# Altium footprint library Altium_Box_Header_MPC3.PcbLib: 235 footprints (part 3 of 15)
Each footprint in its own frame and in the unit in brackets; x right, y up, seen from the top. Pads: shape width x height; smd on the part's side, far side on the other; paste and mask are expansions set on the pad; w line width, h text height; cw(c..) or ccw(c..) is an arc to the next point about the centre after c.
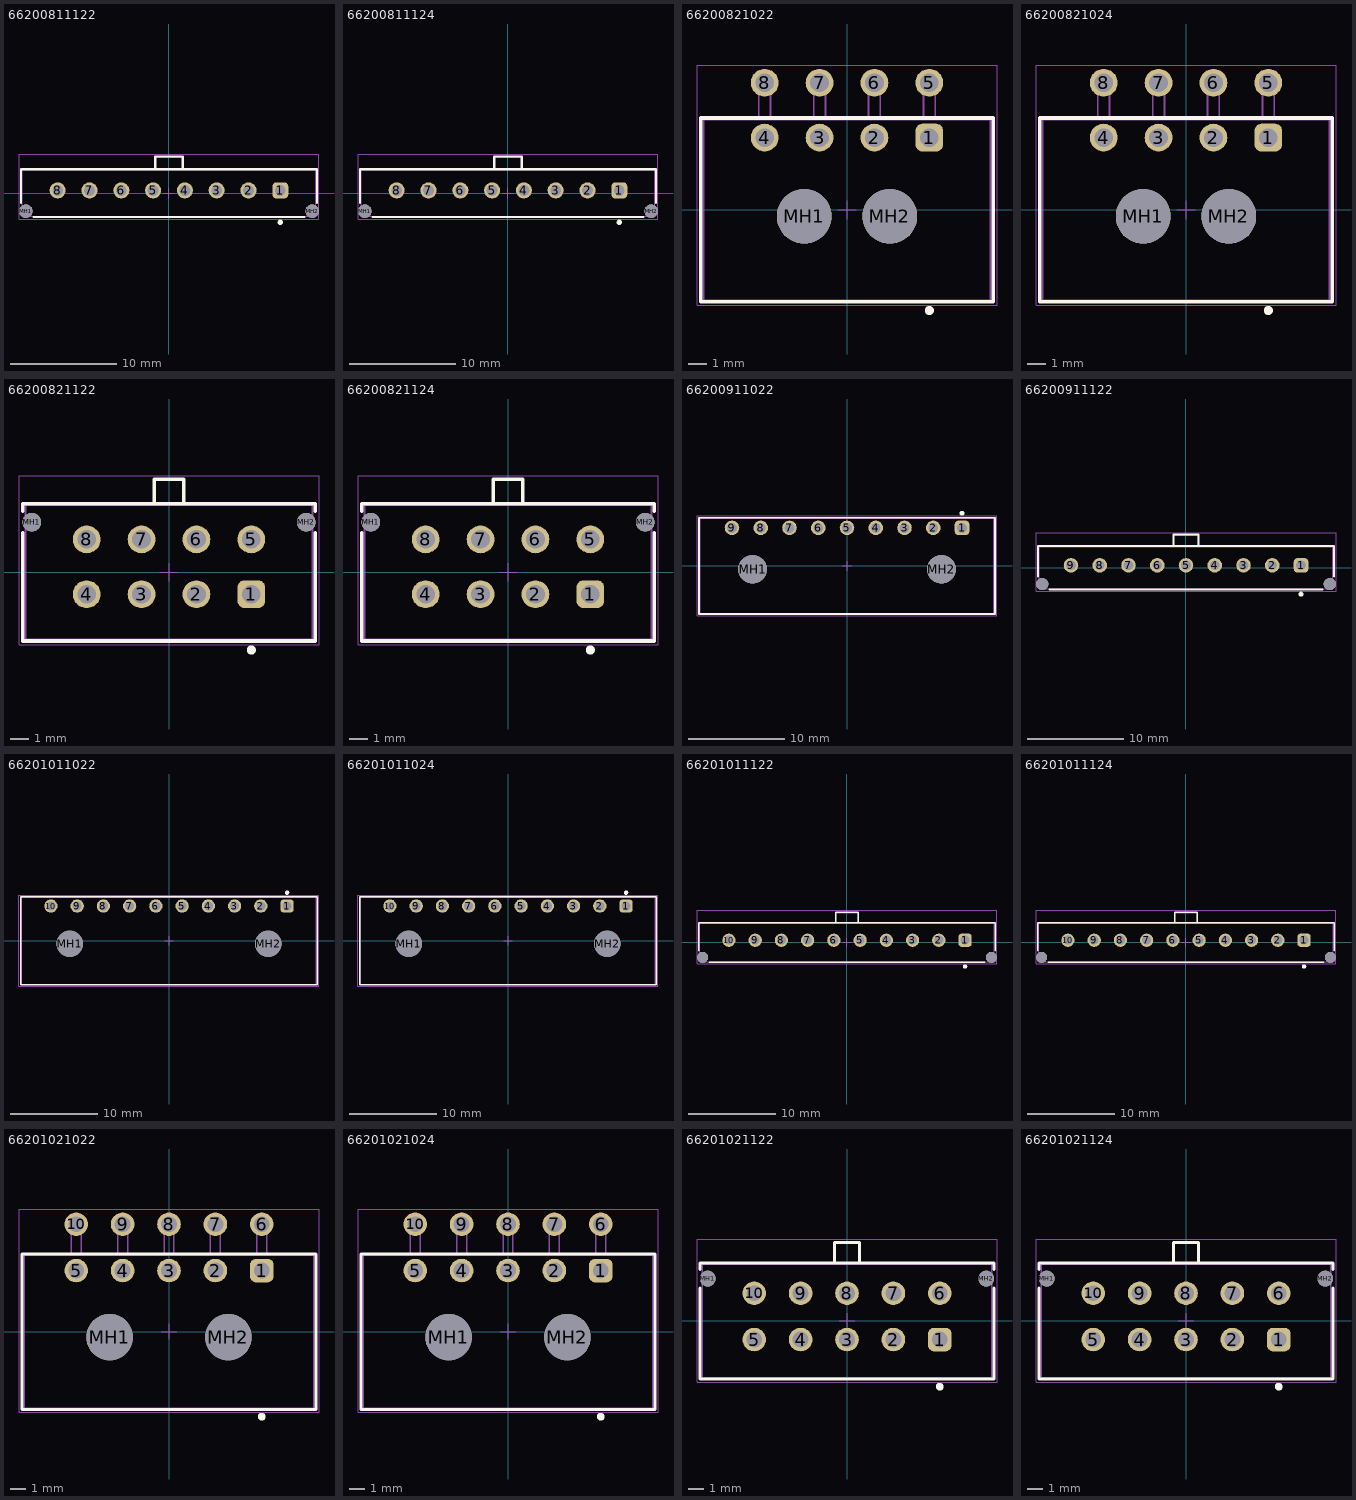
[diagram p2: the footprints below, top view; thin cyan lines are the x and y axes]

## 66200811122 [mm] "3.00mm Male Single Row Vertical Header, 8p"
height 11
pads (10):
  rrect50% 1.52x1.52 hole 1.02: 1(10.5,0.255)
  round 1.52 hole 1.02: 2(7.5,0.255) 3(4.5,0.255) 4(1.5,0.255) 5(-1.5,0.255) 6(-4.5,0.255) 7(-7.5,0.255) 8(-10.5,0.255)
  round 1.27 hole 1.27 unplated: MH1(-13.5,-1.705) MH2(13.5,-1.705)
Top Overlay:
  circle w0.25: c10.5,-2.75 r0.125
  lines w0.2: -13.95,-0.91 -13.95,2.26 13.95,2.26 13.95,-0.91 ; -12.755,-2.26 12.755,-2.26 ; -1.3,2.26 -1.3,3.46 1.3,3.46 1.3,2.26
Top Designator:
  text ".Designator" at -7.498,-0.5 h1.5
Top Component Outline:
  lines w0.1: -1.3,2.185 -1.3,3.385 1.3,3.385 1.3,2.185 ; 13.825,-2.185 13.825,2.185 -13.825,2.185 -13.825,-2.185 13.83,-2.185
Top 3D Body:
  lines w0.1: -1.3,2.185 -1.3,3.385 1.3,3.385 1.3,2.185 ; 13.825,-2.185 13.825,2.185 -13.825,2.185 -13.825,-2.185 13.83,-2.185
Top Courtyard:
  lines w0.05: -14.15,-2.46 -14.15,3.66 14.15,3.66 14.15,-2.46 -14.15,-2.46
Top Component Center:
  lines w0.05: -0.5,0 0.5,0 ; 0,-0.5 0,0.5
3D body "66200811122.stp": height 9.93, standoff -3.15, extent -13.822,-2.185 13.828,3.385

## 66200811124 [mm] "3.00mm Male Single Row Vertical Header, 8p"
height 11
pads (10):
  rrect50% 1.52x1.52 hole 1.02: 1(10.5,0.255)
  round 1.52 hole 1.02: 2(7.5,0.255) 3(4.5,0.255) 4(1.5,0.255) 5(-1.5,0.255) 6(-4.5,0.255) 7(-7.5,0.255) 8(-10.5,0.255)
  round 1.27 hole 1.27 unplated: MH1(-13.5,-1.705) MH2(13.5,-1.705)
Top Overlay:
  circle w0.25: c10.5,-2.75 r0.125
  lines w0.2: -13.95,-0.91 -13.95,2.26 13.95,2.26 13.95,-0.91 ; -12.755,-2.26 12.755,-2.26 ; -1.3,2.26 -1.3,3.46 1.3,3.46 1.3,2.26
Top Designator:
  text ".Designator" at -7.498,-0.5 h1.5
Top Component Outline:
  lines w0.1: -1.3,2.185 -1.3,3.385 1.3,3.385 1.3,2.185 ; 13.825,-2.185 13.825,2.185 -13.825,2.185 -13.825,-2.185 13.83,-2.185
Top 3D Body:
  lines w0.1: -1.3,2.185 -1.3,3.385 1.3,3.385 1.3,2.185 ; 13.825,-2.185 13.825,2.185 -13.825,2.185 -13.825,-2.185 13.83,-2.185
Top Courtyard:
  lines w0.05: -14.15,-2.46 14.15,-2.46 14.15,3.66 -14.15,3.66 -14.15,-2.46
Top Component Center:
  lines w0.05: -0.5,0 0.5,0 ; 0,-0.5 0,0.5
3D body "66200811124.stp": height 9.93, standoff -3.15, extent -13.823,-2.185 13.827,3.385

## 66200821022 [mm] "Dual row Right angle header With plastic peg 08p"
height 8.76
pads (10):
  rrect50% 1.52x1.52 hole 1.02: 1(4.5,3.95)
  round 1.52 hole 1.02: 2(1.5,3.95) 3(-1.5,3.95) 4(-4.5,3.95) 5(4.5,6.95) 6(1.5,6.95) 7(-1.5,6.95) 8(-4.5,6.95)
  round 3 hole 3 unplated: MH1(-2.34,-0.35) MH2(2.34,-0.35)
Top Overlay:
  circle w0.25: c4.5,-5.5 r0.125
  lines w0.2: -8,-5.025 -8,5.025 8,5.025 8,-5.025 -8,-5.025
Top Designator:
  text ".Designator" at -7.498,-0.5 h1.5
Top Component Outline:
  lines w0.1: -4.82,4.95 -4.82,7.27 -4.18,7.27 -4.18,4.95 ; -1.82,4.95 -1.82,7.27 -1.18,7.27 -1.18,4.95 ; 1.18,4.95 1.18,7.27 1.82,7.27 1.82,4.95 ; 4.18,4.95 4.18,7.27 4.82,7.27 4.82,4.95 ; -7.85,-4.95 -7.85,4.95 7.85,4.95 7.85,-4.95 -7.85,-4.95
Top 3D Body:
  lines w0.1: -4.82,4.95 -4.82,7.27 -4.18,7.27 -4.18,4.95 ; -1.82,4.95 -1.82,7.27 -1.18,7.27 -1.18,4.95 ; 1.18,4.95 1.18,7.27 1.82,7.27 1.82,4.95 ; 4.18,4.95 4.18,7.27 4.82,7.27 4.82,4.95 ; -7.85,-4.95 7.85,-4.95 7.85,4.95 -7.85,4.95 -7.85,-4.95
Top Courtyard:
  lines w0.05: -8.2,-5.225 -8.2,7.91 8.2,7.91 8.2,-5.225 -8.2,-5.225
Top Component Center:
  lines w0.05: -0.5,0 0.5,0 ; 0,-0.5 0,0.5
3D body "62000821022.stp": height 8.79, standoff -3.17, extent -7.85,-4.95 7.85,7.27

## 66200821024 [mm] "Dual row Right angle header With plastic peg 08p"
height 8.76
pads (10):
  rrect50% 1.52x1.52 hole 1.02: 1(4.5,3.95)
  round 1.52 hole 1.02: 2(1.5,3.95) 3(-1.5,3.95) 4(-4.5,3.95) 5(4.5,6.95) 6(1.5,6.95) 7(-1.5,6.95) 8(-4.5,6.95)
  round 3 hole 3 unplated: MH1(-2.34,-0.35) MH2(2.34,-0.35)
Top Overlay:
  circle w0.25: c4.5,-5.5 r0.125
  lines w0.2: -8,-5.025 -8,5.025 8,5.025 8,-5.025 -8,-5.025
Top Designator:
  text ".Designator" at -7.498,-0.5 h1.5
Top Component Outline:
  lines w0.1: -4.82,4.95 -4.82,7.27 -4.18,7.27 -4.18,4.95 ; -1.82,4.95 -1.82,7.27 -1.18,7.27 -1.18,4.95 ; 1.18,4.95 1.18,7.27 1.82,7.27 1.82,4.95 ; 4.18,4.95 4.18,7.27 4.82,7.27 4.82,4.95 ; -7.85,-4.95 -7.85,4.95 7.85,4.95 7.85,-4.95 -7.85,-4.95
Top 3D Body:
  lines w0.1: -4.82,4.95 -4.82,7.27 -4.18,7.27 -4.18,4.95 ; -1.82,4.95 -1.82,7.27 -1.18,7.27 -1.18,4.95 ; 1.18,4.95 1.18,7.27 1.82,7.27 1.82,4.95 ; 4.18,4.95 4.18,7.27 4.82,7.27 4.82,4.95 ; -7.85,-4.95 7.85,-4.95 7.85,4.95 -7.85,4.95 -7.85,-4.95
Top Courtyard:
  lines w0.05: -8.2,-5.225 -8.2,7.91 8.2,7.91 8.2,-5.225 -8.2,-5.225
Top Component Center:
  lines w0.05: -0.5,0 0.5,0 ; 0,-0.5 0,0.5
3D body "66200821024.stp": height 8.78, standoff -3.18, extent -7.856,-4.948 7.851,7.278

## 66200821122 [mm] "Dual row Vertical header 08p"
height 9.9
pads (10):
  rrect50% 1.52x1.52 hole 1.02: 1(4.5,-1.2)
  round 1.52 hole 1.02: 2(1.5,-1.2) 3(-1.5,-1.2) 4(-4.5,-1.2) 5(4.5,1.8) 6(1.5,1.8) 7(-1.5,1.8) 8(-4.5,1.8)
  round 1.02 hole 1.02 unplated: MH1(-7.5,2.74) MH2(7.5,2.74)
Top Overlay:
  circle w0.25: c4.5,-4.25 r0.125
  lines w0.2: -8,2.145 -8,-3.755 8,-3.755 8,2.145 ; -8,3.345 -8,3.755 8,3.755 8,3.345 ; -0.8,3.755 -0.8,5.08 0.8,5.08 0.8,3.755
Top Designator:
  text ".Designator" at -7.498,-0.5 h1.5
Top Component Outline:
  lines w0.1: -0.8,3.68 -0.8,5.08 0.8,5.08 0.8,3.68 ; -7.85,-3.68 7.85,-3.68 7.85,3.68 -7.85,3.68 -7.85,-3.68
Top 3D Body:
  lines w0.1: -0.8,3.68 -0.8,5.08 0.8,5.08 0.8,3.68 ; -7.85,-3.68 7.85,-3.68 7.85,3.68 -7.85,3.68 -7.85,-3.68
Top Courtyard:
  lines w0.05: -8.2,-3.955 8.2,-3.955 8.2,5.28 -8.2,5.28 -8.2,-3.955
Top Component Center:
  lines w0.05: -0.5,0 0.5,0 ; 0,-0.5 0,0.5
3D body "66200821122.stp": height 9.93, standoff -3.17, extent -7.85,-3.68 7.85,5.08

## 66200821124 [mm] "Dual row Vertical header 08p"
height 9.9
pads (10):
  rrect50% 1.52x1.52 hole 1.02: 1(4.5,-1.2)
  round 1.52 hole 1.02: 2(1.5,-1.2) 3(-1.5,-1.2) 4(-4.5,-1.2) 5(4.5,1.8) 6(1.5,1.8) 7(-1.5,1.8) 8(-4.5,1.8)
  round 1.02 hole 1.02 unplated: MH1(-7.5,2.74) MH2(7.5,2.74)
Top Overlay:
  circle w0.25: c4.5,-4.25 r0.125
  lines w0.2: -8,2.145 -8,-3.755 8,-3.755 8,2.145 ; -8,3.345 -8,3.755 8,3.755 8,3.345 ; -0.8,3.755 -0.8,5.08 0.8,5.08 0.8,3.755
Top Designator:
  text ".Designator" at -7.498,-0.5 h1.5
Top Component Outline:
  lines w0.1: -0.8,3.68 -0.8,5.08 0.8,5.08 0.8,3.68 ; -7.85,-3.68 -7.85,3.68 7.85,3.68 7.85,-3.68 -7.85,-3.68
Top 3D Body:
  lines w0.1: -0.8,3.68 -0.8,5.08 0.8,5.08 0.8,3.68 ; -7.85,-3.68 -7.85,3.68 7.85,3.68 7.85,-3.68 -7.85,-3.68
Top Courtyard:
  lines w0.05: -8.2,-3.955 -8.2,5.28 8.2,5.28 8.2,-3.955 -8.2,-3.955
Top Component Center:
  lines w0.05: -0.5,0 0.5,0 ; 0,-0.5 0,0.5
3D body "66200821124.stp": height 9.93, standoff -3.17, extent -7.85,-3.68 7.85,5.08

## 66200911022 [mm] "3.00mm Male Single Row Angled Header with Plastic Pegs, 9p"
height 5.07
pads (11):
  rrect50% 1.52x1.52 hole 1.02: 1(12,3.97)
  round 1.52 hole 1.02: 2(9,3.97) 3(6,3.97) 4(3,3.97) 5(0,3.97) 6(-3,3.97) 7(-6,3.97) 8(-9,3.97) 9(-12,3.97)
  round 3 hole 3 unplated: MH1(-9.85,-0.35) MH2(9.85,-0.35)
Top Overlay:
  circle w0.25: c12,5.5 r0.125
  lines w0.2: -15.45,-5.025 15.45,-5.025 15.45,5.025 -15.45,5.025 -15.45,-5.025
Top Designator:
  text ".Designator" at -7.498,-0.5 h1.5
Top Component Outline:
  lines w0.1: -15.325,-4.95 -15.325,4.95 15.325,4.95 15.325,-4.95 -15.325,-4.95
Top 3D Body:
  lines w0.1: -15.325,-4.95 -15.325,4.95 15.325,4.95 15.325,-4.95 -15.325,-4.95
Top Courtyard:
  lines w0.05: -15.65,-5.225 15.65,-5.225 15.65,5.225 -15.65,5.225 -15.65,-5.225
Top Component Center:
  lines w0.05: -0.5,0 0.5,0 ; 0,-0.5 0,0.5
3D body "66200911022.stp": height 5.6, standoff -3.16, extent -15.325,-4.95 15.325,4.95

## 66200911122 [mm] "3.00mm Male Single Row Vertical Header, 9p"
height 11
pads (11):
  rrect50% 1.52x1.52 hole 1.02: 1(12,0.255)
  round 1.52 hole 1.02: 2(9,0.255) 3(6,0.255) 4(3,0.255) 5(0,0.255) 6(-3,0.255) 7(-6,0.255) 8(-9,0.255) 9(-12,0.255)
  round 1.27 hole 1.27 unplated: MH1(-15,-1.705) MH2(15,-1.705)
Top Overlay:
  circle w0.25: c12,-2.75 r0.125
  lines w0.2: -15.45,-0.91 -15.45,2.26 15.45,2.26 15.45,-0.91 ; -14.255,-2.26 14.255,-2.26 ; -1.3,2.26 -1.3,3.46 1.3,3.46 1.3,2.26
Top Designator:
  text ".Designator" at -7.498,-0.5 h1.5
Top Component Outline:
  lines w0.1: -1.3,2.185 -1.3,3.385 1.3,3.385 1.3,2.185 ; 15.325,-2.185 15.325,2.185 -15.325,2.185 -15.325,-2.185 15.33,-2.185
Top 3D Body:
  lines w0.1: -1.3,2.185 -1.3,3.385 1.3,3.385 1.3,2.185 ; 15.325,-2.185 15.325,2.185 -15.325,2.185 -15.325,-2.185 15.33,-2.185
Top Courtyard:
  lines w0.05: -15.65,-2.46 15.65,-2.46 15.65,3.66 -15.65,3.66 -15.65,-2.46
Top Component Center:
  lines w0.05: -0.5,0 0.5,0 ; 0,-0.5 0,0.5
3D body "66200911122.stp": height 9.93, standoff -3.15, extent -15.322,-2.185 15.328,3.385

## 66201011022 [mm] "3.00mm Male Single Row Angled Header with Plastic Pegs, 10p"
height 5.07
pads (12):
  rrect50% 1.52x1.52 hole 1.02: 1(13.5,3.97)
  round 1.52 hole 1.02: 2(10.5,3.97) 3(7.5,3.97) 4(4.5,3.97) 5(1.5,3.97) 6(-1.5,3.97) 7(-4.5,3.97) 8(-7.5,3.97) 9(-10.5,3.97) 10(-13.5,3.97)
  round 3 hole 3 unplated: MH1(-11.35,-0.35) MH2(11.35,-0.35)
Top Overlay:
  circle w0.25: c13.5,5.5 r0.125
  lines w0.2: -16.95,-5.025 -16.95,5.025 16.95,5.025 16.95,-5.025 -16.95,-5.025
Top Designator:
  text ".Designator" at -7.498,-0.5 h1.5
Top Component Outline:
  lines w0.1: -16.825,-4.95 16.825,-4.95 16.825,4.95 -16.825,4.95 -16.825,-4.95
Top 3D Body:
  lines w0.1: -16.825,-4.95 16.825,-4.95 16.825,4.95 -16.825,4.95 -16.825,-4.95
Top Courtyard:
  lines w0.05: -17.15,-5.225 -17.15,5.225 17.15,5.225 17.15,-5.225 -17.15,-5.225
Top Component Center:
  lines w0.05: -0.5,0 0.5,0 ; 0,-0.5 0,0.5
3D body "66201011022.stp": height 5.6, standoff -3.16, extent -16.825,-4.95 16.825,4.95

## 66201011024 [mm] "3.00mm Male Single Row Angled Header with Plastic Pegs, 10p"
height 5.07
pads (12):
  rrect50% 1.52x1.52 hole 1.02: 1(13.5,3.97)
  round 1.52 hole 1.02: 2(10.5,3.97) 3(7.5,3.97) 4(4.5,3.97) 5(1.5,3.97) 6(-1.5,3.97) 7(-4.5,3.97) 8(-7.5,3.97) 9(-10.5,3.97) 10(-13.5,3.97)
  round 3 hole 3 unplated: MH1(-11.35,-0.35) MH2(11.35,-0.35)
Top Overlay:
  circle w0.25: c13.5,5.5 r0.125
  lines w0.2: -16.95,-5.025 -16.95,5.025 16.95,5.025 16.95,-5.025 -16.95,-5.025
Top Designator:
  text ".Designator" at -7.498,-0.5 h1.5
Top Component Outline:
  lines w0.1: -16.825,-4.95 16.825,-4.95 16.825,4.95 -16.825,4.95 -16.825,-4.95
Top 3D Body:
  lines w0.1: -16.825,-4.95 16.825,-4.95 16.825,4.95 -16.825,4.95 -16.825,-4.95
Top Courtyard:
  lines w0.05: -17.15,-5.225 -17.15,5.225 17.15,5.225 17.15,-5.225 -17.15,-5.225
Top Component Center:
  lines w0.05: -0.5,0 0.5,0 ; 0,-0.5 0,0.5
3D body "66201011024.stp": height 5.6, standoff -3.16, extent -16.825,-4.95 16.825,4.95

## 66201011122 [mm] "3.00mm Male Single Row Vertical Header, 10p"
height 11
pads (12):
  rrect50% 1.52x1.52 hole 1.02: 1(13.5,0.255)
  round 1.52 hole 1.02: 2(10.5,0.255) 3(7.5,0.255) 4(4.5,0.255) 5(1.5,0.255) 6(-1.5,0.255) 7(-4.5,0.255) 8(-7.5,0.255) 9(-10.5,0.255) 10(-13.5,0.255)
  round 1.27 hole 1.27 unplated: MH1(-16.5,-1.705) MH2(16.5,-1.705)
Top Overlay:
  circle w0.25: c13.5,-2.75 r0.125
  lines w0.2: -16.95,-0.91 -16.95,2.26 16.95,2.26 16.95,-0.91 ; -15.755,-2.26 15.755,-2.26 ; -1.3,2.26 -1.3,3.46 1.3,3.46 1.3,2.26
Top Designator:
  text ".Designator" at -7.498,-0.5 h1.5
Top Component Outline:
  lines w0.1: -1.3,2.185 -1.3,3.385 1.3,3.385 1.3,2.185 ; 16.825,-2.185 16.825,2.185 -16.825,2.185 -16.825,-2.185 16.83,-2.185
Top 3D Body:
  lines w0.1: -1.3,2.185 -1.3,3.385 1.3,3.385 1.3,2.185 ; 16.825,-2.185 16.825,2.185 -16.825,2.185 -16.825,-2.185 16.83,-2.185
Top Courtyard:
  lines w0.05: -17.15,-2.46 -17.15,3.66 17.15,3.66 17.15,-2.46 -17.15,-2.46
Top Component Center:
  lines w0.05: -0.5,0 0.5,0 ; 0,-0.5 0,0.5
3D body "66201011122.stp": height 9.93, standoff -3.15, extent -16.822,-2.185 16.827,3.385

## 66201011124 [mm] "3.00mm Male Single Row Vertical Header, 10p"
height 11
pads (12):
  rrect50% 1.52x1.52 hole 1.02: 1(13.5,0.255)
  round 1.52 hole 1.02: 2(10.5,0.255) 3(7.5,0.255) 4(4.5,0.255) 5(1.5,0.255) 6(-1.5,0.255) 7(-4.5,0.255) 8(-7.5,0.255) 9(-10.5,0.255) 10(-13.5,0.255)
  round 1.27 hole 1.27 unplated: MH1(-16.5,-1.705) MH2(16.5,-1.705)
Top Overlay:
  circle w0.25: c13.5,-2.75 r0.125
  lines w0.2: -16.95,-0.91 -16.95,2.26 16.95,2.26 16.95,-0.91 ; -15.755,-2.26 15.755,-2.26 ; -1.3,2.26 -1.3,3.46 1.3,3.46 1.3,2.26
Top Designator:
  text ".Designator" at -7.498,-0.5 h1.5
Top Component Outline:
  lines w0.1: -1.3,2.185 -1.3,3.385 1.3,3.385 1.3,2.185 ; 16.825,-2.185 16.825,2.185 -16.825,2.185 -16.825,-2.185 16.83,-2.185
Top 3D Body:
  lines w0.1: -1.3,2.185 -1.3,3.385 1.3,3.385 1.3,2.185 ; 16.825,-2.185 16.825,2.185 -16.825,2.185 -16.825,-2.185 16.83,-2.185
Top Courtyard:
  lines w0.05: -17.15,-2.46 17.15,-2.46 17.15,3.66 -17.15,3.66 -17.15,-2.46
Top Component Center:
  lines w0.05: -0.5,0 0.5,0 ; 0,-0.5 0,0.5
3D body "66201011124.stp": height 9.93, standoff -3.15, extent -16.823,-2.185 16.827,3.385

## 66201021022 [mm] "Dual row Right angle header With plastic peg 10p"
height 8.76
pads (12):
  rrect50% 1.52x1.52 hole 1.02: 1(6,3.95)
  round 1.52 hole 1.02: 2(3,3.95) 3(0,3.95) 4(-3,3.95) 5(-6,3.95) 6(6,6.95) 7(3,6.95) 8(0,6.95) 9(-3,6.95) 10(-6,6.95)
  round 3 hole 3 unplated: MH1(-3.84,-0.35) MH2(3.84,-0.35)
Top Overlay:
  circle w0.25: c6,-5.5 r0.125
  lines w0.2: -9.5,-5.025 9.5,-5.025 9.5,5.025 -9.5,5.025 -9.5,-5.025
Top Designator:
  text ".Designator" at -7.498,-0.5 h1.5
Top Component Outline:
  lines w0.1: -6.32,4.95 -6.32,7.27 -5.68,7.27 -5.68,4.95 ; -3.32,4.95 -3.32,7.27 -2.68,7.27 -2.68,4.95 ; -0.32,4.95 -0.32,7.27 0.32,7.27 0.32,4.95 ; 2.68,4.95 2.68,7.27 3.32,7.27 3.32,4.95 ; 5.68,4.95 5.68,7.27 6.32,7.27 6.32,4.95 ; -9.35,-4.95 -9.35,4.95 9.35,4.95 9.35,-4.95 -9.35,-4.95
Top 3D Body:
  lines w0.1: -6.32,4.95 -6.32,7.27 -5.68,7.27 -5.68,4.95 ; -3.32,4.95 -3.32,7.27 -2.68,7.27 -2.68,4.95 ; -0.32,4.95 -0.32,7.27 0.32,7.27 0.32,4.95 ; 2.68,4.95 2.68,7.27 3.32,7.27 3.32,4.95 ; 5.68,4.95 5.68,7.27 6.32,7.27 6.32,4.95 ; -9.35,-4.95 -9.35,4.95 9.35,4.95 9.35,-4.95 -9.35,-4.95
Top Courtyard:
  lines w0.05: -9.7,-5.225 9.7,-5.225 9.7,7.91 -9.7,7.91 -9.7,-5.225
Top Component Center:
  lines w0.05: -0.5,0 0.5,0 ; 0,-0.5 0,0.5
3D body "62001021022.stp": height 8.79, standoff -3.17, extent -9.35,-4.95 9.35,7.27

## 66201021024 [mm] "Dual row Right angle header With plastic peg 10p"
height 8.76
pads (12):
  rrect50% 1.52x1.52 hole 1.02: 1(6,3.95)
  round 1.52 hole 1.02: 2(3,3.95) 3(0,3.95) 4(-3,3.95) 5(-6,3.95) 6(6,6.95) 7(3,6.95) 8(0,6.95) 9(-3,6.95) 10(-6,6.95)
  round 3 hole 3 unplated: MH1(-3.84,-0.35) MH2(3.84,-0.35)
Top Overlay:
  circle w0.25: c6,-5.5 r0.125
  lines w0.2: -9.5,-5.025 -9.5,5.025 9.5,5.025 9.5,-5.025 -9.5,-5.025
Top Designator:
  text ".Designator" at -7.498,-0.5 h1.5
Top Component Outline:
  lines w0.1: -6.32,4.95 -6.32,7.27 -5.68,7.27 -5.68,4.95 ; -3.32,4.95 -3.32,7.27 -2.68,7.27 -2.68,4.95 ; -0.32,4.95 -0.32,7.27 0.32,7.27 0.32,4.95 ; 2.68,4.95 2.68,7.27 3.32,7.27 3.32,4.95 ; 5.68,4.95 5.68,7.27 6.32,7.27 6.32,4.95 ; -9.35,-4.95 9.35,-4.95 9.35,4.95 -9.35,4.95 -9.35,-4.95
Top 3D Body:
  lines w0.1: -6.32,4.95 -6.32,7.27 -5.68,7.27 -5.68,4.95 ; -3.32,4.95 -3.32,7.27 -2.68,7.27 -2.68,4.95 ; -0.32,4.95 -0.32,7.27 0.32,7.27 0.32,4.95 ; 2.68,4.95 2.68,7.27 3.32,7.27 3.32,4.95 ; 5.68,4.95 5.68,7.27 6.32,7.27 6.32,4.95 ; -9.35,-4.95 9.35,-4.95 9.35,4.95 -9.35,4.95 -9.35,-4.95
Top Courtyard:
  lines w0.05: -9.7,-5.225 -9.7,7.91 9.7,7.91 9.7,-5.225 -9.7,-5.225
Top Component Center:
  lines w0.05: -0.5,0 0.5,0 ; 0,-0.5 0,0.5
3D body "66201021024.stp": height 8.78, standoff -3.18, extent -9.354,-4.953 9.354,7.278

## 66201021122 [mm] "Dual row Vertical header 10p"
height 9.9
pads (12):
  rrect50% 1.52x1.52 hole 1.02: 1(6,-1.2)
  round 1.52 hole 1.02: 2(3,-1.2) 3(0,-1.2) 4(-3,-1.2) 5(-6,-1.2) 6(6,1.8) 7(3,1.8) 8(0,1.8) 9(-3,1.8) 10(-6,1.8)
  round 1.02 hole 1.02 unplated: MH1(-9,2.74) MH2(9,2.74)
Top Overlay:
  circle w0.25: c6,-4.25 r0.125
  lines w0.2: -9.5,2.145 -9.5,-3.755 9.5,-3.755 9.5,2.145 ; -9.5,3.345 -9.5,3.755 9.5,3.755 9.5,3.345 ; -0.8,3.755 -0.8,5.08 0.8,5.08 0.8,3.755
Top Designator:
  text ".Designator" at -7.498,-0.5 h1.5
Top Component Outline:
  lines w0.1: -0.8,3.68 -0.8,5.08 0.8,5.08 0.8,3.68 ; -9.35,-3.68 -9.35,3.68 9.35,3.68 9.35,-3.68 -9.35,-3.68
Top 3D Body:
  lines w0.1: -0.8,3.68 -0.8,5.08 0.8,5.08 0.8,3.68 ; -9.35,-3.68 -9.35,3.68 9.35,3.68 9.35,-3.68 -9.35,-3.68
Top Courtyard:
  lines w0.05: -9.7,-3.955 -9.7,5.28 9.7,5.28 9.7,-3.955 -9.7,-3.955
Top Component Center:
  lines w0.05: -0.5,0 0.5,0 ; 0,-0.5 0,0.5
3D body "66201021122.stp": height 9.93, standoff -3.17, extent -9.35,-3.68 9.35,5.08

## 66201021124 [mm] "Dual row Vertical header 10p"
height 9.9
pads (12):
  rrect50% 1.52x1.52 hole 1.02: 1(6,-1.2)
  round 1.52 hole 1.02: 2(3,-1.2) 3(0,-1.2) 4(-3,-1.2) 5(-6,-1.2) 6(6,1.8) 7(3,1.8) 8(0,1.8) 9(-3,1.8) 10(-6,1.8)
  round 1.02 hole 1.02 unplated: MH1(-9,2.74) MH2(9,2.74)
Top Overlay:
  circle w0.25: c6,-4.25 r0.125
  lines w0.2: -9.5,2.145 -9.5,-3.755 9.5,-3.755 9.5,2.145 ; -9.5,3.345 -9.5,3.755 9.5,3.755 9.5,3.345 ; -0.8,3.755 -0.8,5.08 0.8,5.08 0.8,3.755
Top Designator:
  text ".Designator" at -7.498,-0.5 h1.5
Top Component Outline:
  lines w0.1: -0.8,3.68 -0.8,5.08 0.8,5.08 0.8,3.68 ; -9.35,-3.68 -9.35,3.68 9.35,3.68 9.35,-3.68 -9.35,-3.68
Top 3D Body:
  lines w0.1: -0.8,3.68 -0.8,5.08 0.8,5.08 0.8,3.68 ; -9.35,-3.68 -9.35,3.68 9.35,3.68 9.35,-3.68 -9.35,-3.68
Top Courtyard:
  lines w0.05: -9.7,-3.955 -9.7,5.28 9.7,5.28 9.7,-3.955 -9.7,-3.955
Top Component Center:
  lines w0.05: -0.5,0 0.5,0 ; 0,-0.5 0,0.5
3D body "66201021124.stp": height 9.93, standoff -3.17, extent -9.35,-3.68 9.35,5.08